# Altium footprint library Transistors-Thyristors.PcbLib: 9 footprints
Each footprint in its own frame and in the unit in brackets; x right, y up, seen from the top. Pads: shape width x height; smd on the part's side, far side on the other; paste and mask are expansions set on the pad; w line width, h text height; cw(c..) or ccw(c..) is an arc to the next point about the centre after c.
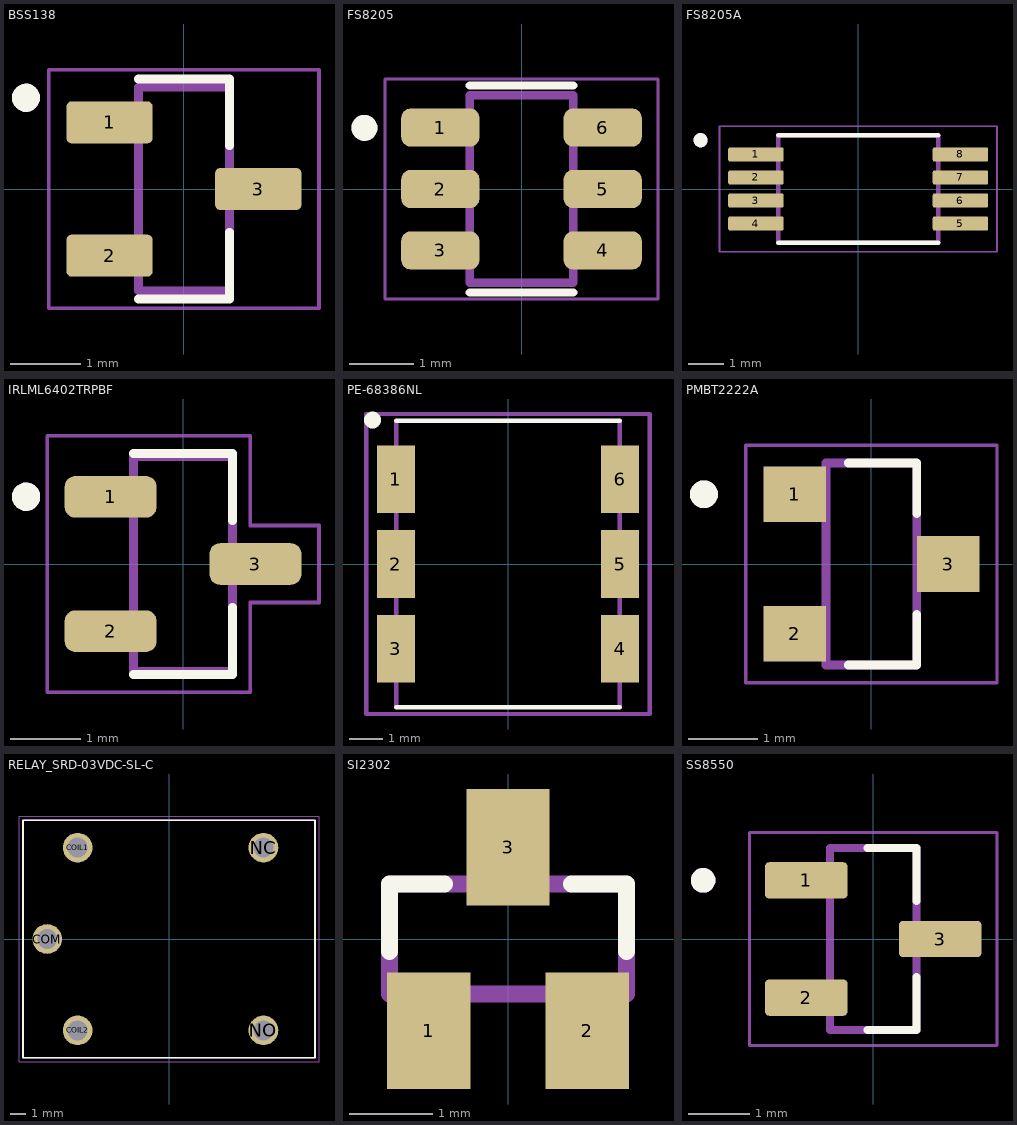
[diagram p0: the footprints below, top view; thin cyan lines are the x and y axes]

## BSS138 [mm] "SOT95P240X111-3N"
pads (3):
  rrect25% 1.23x0.6 smd: 1(-1.06,0.95) 2(-1.06,-0.95) 3(1.06,0)
Top Overlay:
  circle w0.2: c-2.25,1.3 r0.1
  lines w0.127: -0.65,-1.57 0.65,-1.57 0.65,-0.62 ; -0.65,1.57 0.65,1.57 0.65,0.62
Mechanical 13:
  circle w0.2: c-2.25,1.3 r0.1
  lines w0.127: -0.65,-1.45 0.65,-1.45 0.65,1.45 -0.65,1.45 -0.65,-1.45
Mechanical 15:
  lines w0.05: -1.925,-1.7 -1.925,1.7 1.925,1.7 1.925,-1.7 -1.925,-1.7
3D body "BSS138.STEP": height 1.11, standoff 0, extent -1.2,-1.45 1.2,1.45

## FS8205 [mm] "SOT95P280X145-6N"
height 1.45
pads (6):
  rrect50% 1.21x0.59 smd: 1(-1.255,0.95) 2(-1.255,0) 3(-1.255,-0.95) 4(1.255,-0.95) 5(1.255,0) 6(1.255,0.95)
Top Overlay:
  circle w0.2: c-2.428,0.945 r0.1
  lines w0.127: -0.8,-1.6 0.8,-1.6 ; -0.8,1.6 0.8,1.6
Mechanical 13:
  circle w0.2: c-2.428,0.945 r0.1
  lines w0.127: -0.8,-1.45 -0.8,1.45 0.8,1.45 0.8,-1.45 -0.8,-1.45
Mechanical 15:
  lines w0.05: -2.11,-1.7 -2.11,1.7 2.11,1.7 2.11,-1.7 -2.11,-1.7
3D body "step_temp.STEP": height 1.45, standoff 0, extent -1.4,-1.45 1.4,1.45

## FS8205A [mm] "SOP65P640X120-8N"
height 1.2
pads (8):
  rrect25% 1.56x0.4 smd: 1(-2.88,0.975) 2(-2.88,0.325) 3(-2.88,-0.325) 4(-2.88,-0.975) 5(2.88,-0.975) 6(2.88,-0.325) 7(2.88,0.325) 8(2.88,0.975)
Top Overlay:
  circle w0.2: c-4.44,1.375 r0.1
  lines w0.127: -2.25,-1.515 2.25,-1.515 ; -2.25,1.515 2.25,1.515
Mechanical 13:
  circle w0.2: c-4.44,1.375 r0.1
  lines w0.127: -2.25,-1.515 2.25,-1.515 2.25,1.515 -2.25,1.515 -2.25,-1.515
Mechanical 15:
  lines w0.05: -3.91,-1.765 3.91,-1.765 3.91,1.765 -3.91,1.765 -3.91,-1.765
3D body "step_temp.STEP": height 1.2, standoff 0, extent -3.2,-1.465 3.2,1.465

## IRLML6402TRPBF [mm] "SOT95P237X112-3N"
pads (3):
  rrect50% 1.3x0.59 smd: 1(-1.025,0.95) 2(-1.025,-0.95) 3(1.025,0)
Top Overlay:
  circle w0.2: c-2.222,0.953 r0.1
  lines w0.127: -0.7,-1.565 0.7,-1.565 0.7,-0.615 ; -0.7,1.565 0.7,1.565 0.7,0.615
Mechanical 13:
  circle w0.2: c-2.222,0.953 r0.1
  lines w0.127: -0.7,-1.52 0.7,-1.52 0.7,1.52 -0.7,1.52 -0.7,-1.52
Mechanical 15:
  lines w0.05: -1.925,-1.815 -1.925,1.815 0.95,1.815 0.95,0.545 1.925,0.545 1.925,-0.545 0.95,-0.545 0.95,-1.815 -1.925,-1.815
3D body "step_temp.STEP": height 1.12, standoff 0, extent -1.255,-1.46 1.255,1.46

## PE-68386NL [mil] "SOP254P864X249-6N"
pads (6):
  rect 45x80 smd: 1(-132.5,100) 2(-132.5,0) 3(-132.5,-100) 4(132.5,-100) 5(132.5,0) 6(132.5,100)
Top Overlay:
  circle w10: c-160,170 r5
  lines w5: -131.89,-169.29 131.89,-169.29 ; -131.89,169.29 131.89,169.29
Mechanical 13:
  lines w5: -131.89,-169.29 -131.89,169.29 ; 131.89,-169.29 131.89,169.29
Mechanical 15:
  lines w5: -167.32,-177.17 -167.32,177.17 167.32,177.17 167.32,-177.17 -167.32,-177.17
3D body "PE-68386NL--3DModel-Eagle-1.STEP": height 92, standoff -6, extent -170,-122.5 170,142.5

## PMBT2222A [mm] "SOT23: TO-236AB"
height 1.1
pads (3):
  rect 0.9x0.8 smd: 1(-1.1,1) 2(-1.1,-1) 3(1.1,0)
Top Overlay:
  circle w0.2: c-2.4,1 r0.1
  lines w0.127: -0.33,-1.45 0.65,-1.45 0.65,-0.72 ; -0.33,1.45 0.65,1.45 0.65,0.72
Mechanical 13:
  circle w0.2: c-2.4,1 r0.1
  lines w0.127: -0.65,-1.45 0.65,-1.45 0.65,1.45 -0.65,1.45 -0.65,-1.45
Mechanical 15:
  lines w0.05: -1.8,-1.7 -1.8,1.7 1.8,1.7 1.8,-1.7 -1.8,-1.7
3D body "step_temp.STEP": height 1.1, standoff 0, extent -1.25,-1.45 1.25,1.45

## RELAY_SRD-03VDC-SL-C [mm] "RELAY_SRD-03VDC-SL-C"
height 15.8
pads (5):
  round 1.95 hole 1.3: COIL1(-6,6) COIL2(-6,-6) COM(-8,0) NC(6.2,6) NO(6.2,-6)
Top Overlay:
  lines w0.127: -9.6,-7.8 9.6,-7.8 9.6,7.8 -9.6,7.8 -9.6,-7.8
Mechanical 13:
  lines w0.127: -9.6,-7.8 9.6,-7.8 9.6,7.8 -9.6,7.8 -9.6,-7.8
Mechanical 15:
  lines w0.05: -9.85,-8.05 9.85,-8.05 9.85,8.05 -9.85,8.05 -9.85,-8.05
3D body "step_temp.STEP": height 15.8, standoff -3, extent -9.6,-7.8 9.6,7.8

## SI2302 [mm] "SOT23"
pads (3):
  rect 1x1.4 smd: 1(-0.95,-1.1) 2(0.95,-1.1) 3(0,1.1)
Top Overlay:
  lines w0.203: -1.422,-0.152 -1.422,0.66 -0.764,0.66 ; 0.764,0.66 1.422,0.66 1.422,-0.152
Mechanical 13:
  region: -0.711,-1.296 -1.169,-1.296 -1.169,-0.711 -0.711,-0.711
  region: 1.168,-1.295 0.711,-1.295 0.711,-0.711 1.168,-0.711
  region: 0.229,0.712 -0.229,0.712 -0.229,1.295 0.229,1.295
  lines w0.203: -1.422,-0.66 -1.422,0.66 1.422,0.66 1.422,-0.66 -1.422,-0.66
3D body "SI2302.STEP": height 1.12, standoff 0, extent -1.46,-1.185 1.46,1.185

## SS8550 [mm] "SOT95P252X140-3N"
height 1.4
pads (3):
  rrect25% 1.34x0.59 smd: 1(-1.085,0.95) 2(-1.085,-0.95) 3(1.085,0)
Top Overlay:
  circle w0.2: c-2.755,0.95 r0.1
  lines w0.127: -0.095,-1.475 0.7,-1.475 0.7,-0.615 ; -0.095,1.475 0.7,1.475 0.7,0.615
Mechanical 13:
  circle w0.2: c-2.755,0.95 r0.1
  lines w0.127: -0.7,-1.475 0.7,-1.475 0.7,1.475 -0.7,1.475 -0.7,-1.475
Mechanical 15:
  lines w0.05: -2.005,-1.725 -2.005,1.725 2.005,1.725 2.005,-1.725 -2.005,-1.725
3D body "SS8550.STEP": height 1.4, standoff 0, extent -1.262,-1.45 1.262,1.45